# Altium schematic symbol library CC0603KRX7R9BB473.SchLib: 1 symbol
Pins are listed as number, name and electrical type; pins without a type are passive.

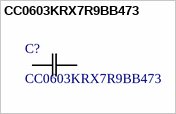
[diagram p0: symbol CC0603KRX7R9BB473]

## CC0603KRX7R9BB473
designator C?
No Description Available; Manufacturer_Name: Yageo; Copyright: Copyright (C) 2026 Ultra Librarian. All rights reserved.; Manufacturer_Part_Number: CC0603KRX7R9BB473
footprint YAG_CC0603_YAG
pins: 1, 2